# Altium footprint library WR-PHD_Socket Header.PcbLib: 279 footprints (part 9 of 18)
Each footprint in its own frame and in the unit in brackets; x right, y up, seen from the top. Pads: shape width x height; smd on the part's side, far side on the other; paste and mask are expansions set on the pad; w line width, h text height; cw(c..) or ccw(c..) is an arc to the next point about the centre after c.
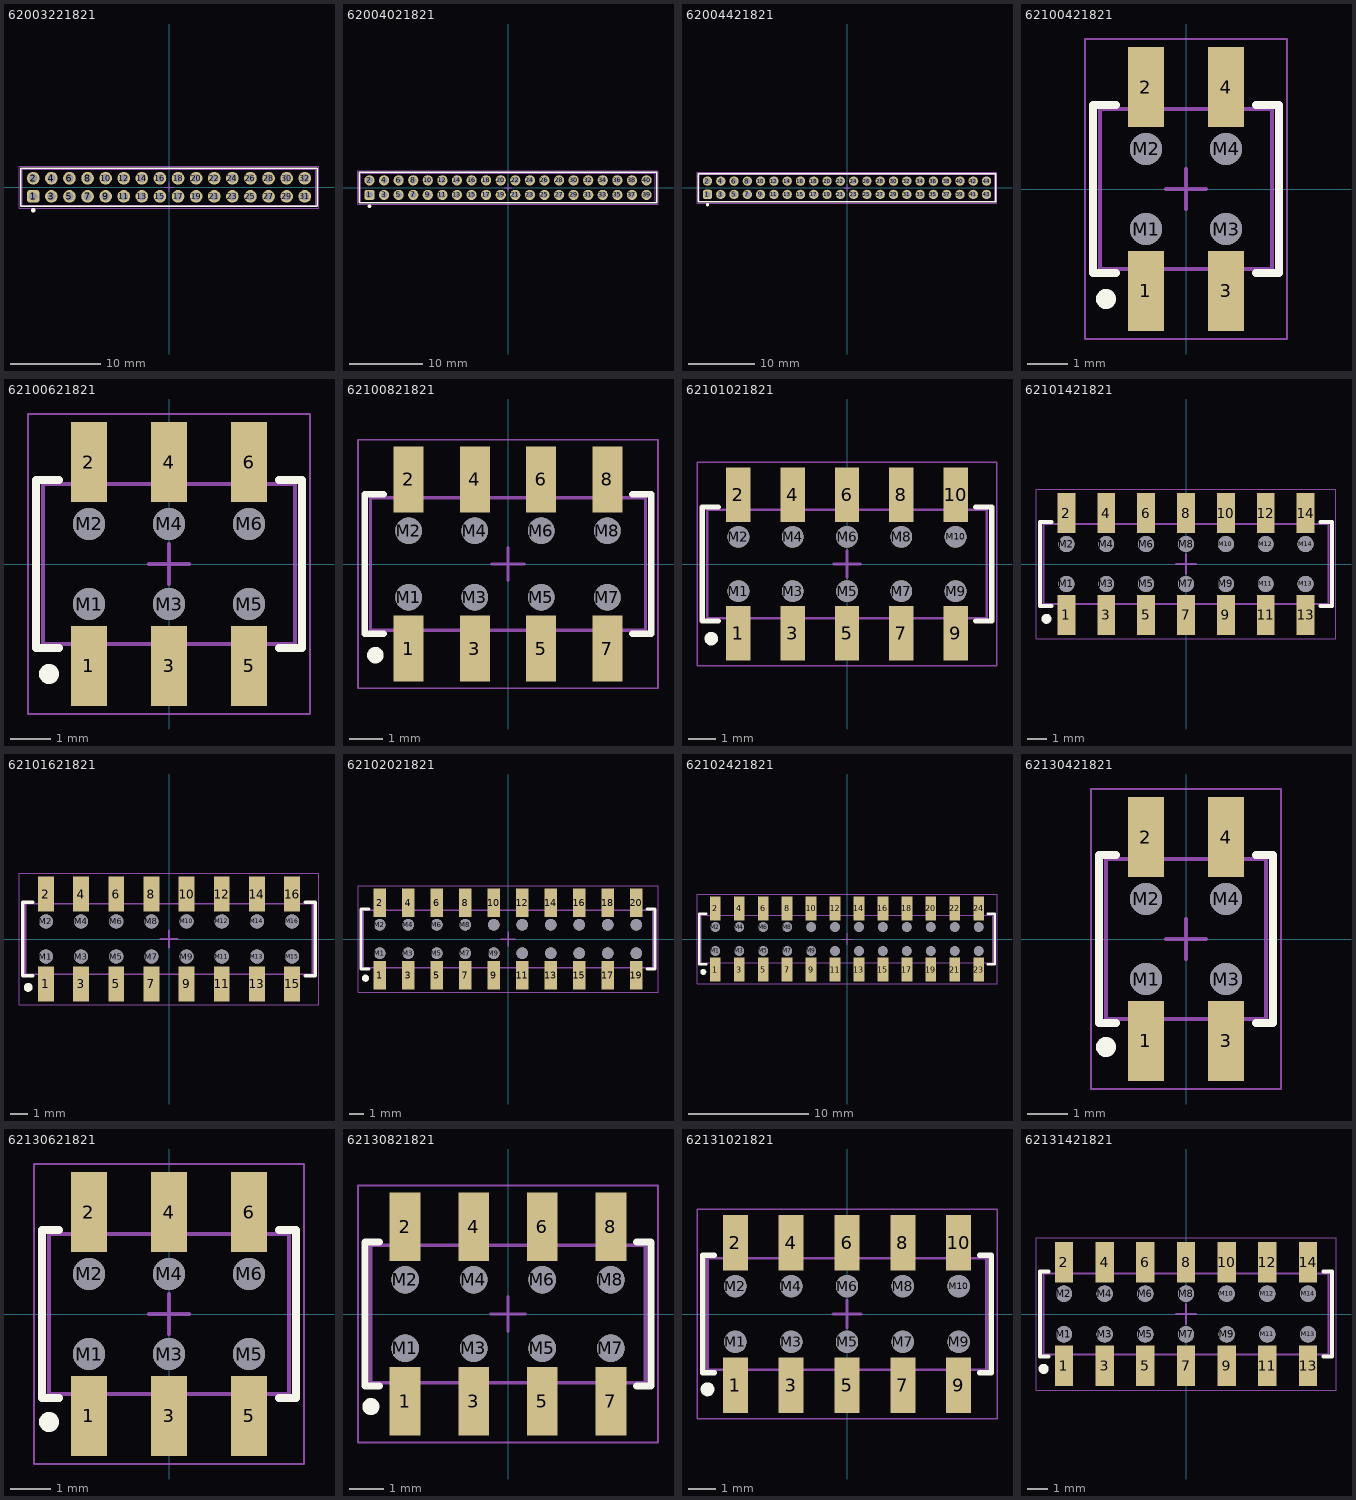
[diagram p8: the footprints below, top view; thin cyan lines are the x and y axes]

## 62003221821 [mm] "Socket Header, Pitch 2.00 mm, THT, Vertical, dual row, 32p"
height 4.45
pads (32):
  rrect50% 1.4x1.4 hole 0.9: 1(-15,-1)
  round 1.4 hole 0.9: 2(-15,1) 3(-13,-1) 4(-13,1) 5(-11,-1) 6(-11,1) 7(-9,-1) 8(-9,1) 9(-7,-1) 10(-7,1) 11(-5,-1) 12(-5,1) 13(-3,-1) 14(-3,1) 15(-1,-1) 16(-1,1) 17(1,-1) 18(1,1) 19(3,-1) 20(3,1) 21(5,-1) 22(5,1) 23(7,-1) 24(7,1) 25(9,-1) 26(9,1) 27(11,-1) 28(11,1) 29(13,-1) 30(13,1) 31(15,-1) 32(15,1)
Top Overlay:
  circle w0.25: c-15,-2.55 r0.125
  lines w0.2: -16.375,-2.1 -16.375,2.1 16.375,2.1 16.375,-2.1 -16.375,-2.1
Top Component Outline:
  lines w0.1: -16.2,-2 16.2,-2 16.2,2 -16.2,2 -16.2,-2
Top Designator:
  text ".Designator" at -3.647,-0.357 h1
Top Courtyard:
  lines w0.05: -16.575,-2.3 16.575,-2.3 16.575,2.3 -16.575,2.3 -16.575,-2.3
Top Component Center:
  lines w0.1: -0.5,0 0.5,0 ; 0,-0.5 0,0.5
3D body "62003221821.stp": height 4.35, standoff -2.65, extent -16.3,-2 16.3,2

## 62004021821 [mm] "Socket Header, Pitch 2.00 mm, THT, Vertical, dual row, 40p"
height 4.45
pads (40):
  rrect50% 1.4x1.4 hole 0.9: 1(-19,-1)
  round 1.4 hole 0.9: 2(-19,1) 3(-17,-1) 4(-17,1) 5(-15,-1) 6(-15,1) 7(-13,-1) 8(-13,1) 9(-11,-1) 10(-11,1) 11(-9,-1) 12(-9,1) 13(-7,-1) 14(-7,1) 15(-5,-1) 16(-5,1) 17(-3,-1) 18(-3,1) 19(-1,-1) 20(-1,1) 21(1,-1) 22(1,1) 23(3,-1) 24(3,1) 25(5,-1) 26(5,1) 27(7,-1) 28(7,1) 29(9,-1) 30(9,1) 31(11,-1) 32(11,1) 33(13,-1) 34(13,1) 35(15,-1) 36(15,1) 37(17,-1) 38(17,1) 39(19,-1) 40(19,1)
Top Overlay:
  circle w0.25: c-19,-2.55 r0.125
  lines w0.2: -20.375,-2.1 -20.375,2.1 20.375,2.1 20.375,-2.1 -20.375,-2.1
Top Component Outline:
  lines w0.1: -20.2,-2 20.2,-2 20.2,2 -20.2,2 -20.2,-2
Top Designator:
  text ".Designator" at -3.647,-0.357 h1
Top Courtyard:
  lines w0.05: -20.575,-2.3 20.575,-2.3 20.575,2.3 -20.575,2.3 -20.575,-2.3
Top Component Center:
  lines w0.1: -0.5,0 0.5,0 ; 0,-0.5 0,0.5
3D body "62004021821.stp": height 4.35, standoff -2.65, extent -20.3,-2 20.3,2

## 62004421821 [mm] "Socket Header, Pitch 2.00 mm, THT, Vertical, dual row, 44p"
height 4.45
pads (44):
  rrect50% 1.4x1.4 hole 0.9: 1(-21,-1)
  round 1.4 hole 0.9: 2(-21,1) 3(-19,-1) 4(-19,1) 5(-17,-1) 6(-17,1) 7(-15,-1) 8(-15,1) 9(-13,-1) 10(-13,1) 11(-11,-1) 12(-11,1) 13(-9,-1) 14(-9,1) 15(-7,-1) 16(-7,1) 17(-5,-1) 18(-5,1) 19(-3,-1) 20(-3,1) 21(-1,-1) 22(-1,1) 23(1,-1) 24(1,1) 25(3,-1) 26(3,1) 27(5,-1) 28(5,1) 29(7,-1) 30(7,1) 31(9,-1) 32(9,1) 33(11,-1) 34(11,1) 35(13,-1) 36(13,1) 37(15,-1) 38(15,1) 39(17,-1) 40(17,1) 41(19,-1) 42(19,1) 43(21,-1) 44(21,1)
Top Overlay:
  circle w0.25: c-21,-2.55 r0.125
  lines w0.2: -22.375,-2.1 22.375,-2.1 22.375,2.1 -22.375,2.1 -22.375,-2.1
Top Component Outline:
  lines w0.1: -22.2,-2 -22.2,2 22.2,2 22.2,-2 -22.2,-2
Top Designator:
  text ".Designator" at -3.647,-0.357 h1
Top Courtyard:
  lines w0.05: -22.575,-2.3 -22.575,2.3 22.575,2.3 22.575,-2.3 -22.575,-2.3
Top Component Center:
  lines w0.1: -0.5,0 0.5,0 ; 0,-0.5 0,0.5
3D body "62004421821.stp": height 4.35, standoff -2.65, extent -22.3,-2 22.3,2

## 62100421821 [mm] "Socket Header, Pitch 2.00 mm, SMT, Vertical, dual row, 4p"
height 2.35
pads (8):
  rect 0.9x2 smd: 1(-1,-2.55) 2(-1,2.55) 3(1,-2.55) 4(1,2.55)
  round 0.8 hole 0.8 unplated: M1(-1,-1) M2(-1,1) M3(1,-1) M4(1,1)
Top Overlay:
  circle w0.25: c-2,-2.75 r0.125
  lines w0.2: -1.75,-2.1 -2.325,-2.1 -2.325,2.1 -1.75,2.1 ; 1.75,-2.1 2.325,-2.1 2.325,2.1 1.75,2.1
Top Component Outline:
  lines w0.1: -1.25,-2 -1.25,-3 -0.75,-3 -0.75,-2 ; -1.25,2 -1.25,3 -0.75,3 -0.75,2 ; 0.75,-2 0.75,-3 1.25,-3 1.25,-2 ; 0.75,2 0.75,3 1.25,3 1.25,2 ; -2.15,-2 2.15,-2 2.15,2 -2.15,2 -2.15,-2
Top Designator:
  text ".Designator" at -3.647,-0.357 h1
Top Courtyard:
  lines w0.05: -2.525,-3.75 2.525,-3.75 2.525,3.75 -2.525,3.75 -2.525,-3.75
Top Component Center:
  lines w0.1: -0.5,0 0.5,0 ; 0,-0.5 0,0.5
3D body "62100421821.stp": height 2.1, standoff 0, extent -2,-3 2,3

## 62100621821 [mm] "Socket Header, Pitch 2.00 mm, SMT, Vertical, dual row, 6p"
height 2.35
pads (12):
  rect 0.9x2 smd: 1(-2,-2.55) 2(-2,2.55) 3(0,-2.55) 4(0,2.55) 5(2,-2.55) 6(2,2.55)
  round 0.8 hole 0.8 unplated: M1(-2,-1) M2(-2,1) M3(0,-1) M4(0,1) M5(2,-1) M6(2,1)
Top Overlay:
  circle w0.25: c-3,-2.75 r0.125
  lines w0.2: -2.75,-2.1 -3.325,-2.1 -3.325,2.1 -2.75,2.1 ; 2.75,-2.1 3.325,-2.1 3.325,2.1 2.75,2.1
Top Component Outline:
  lines w0.1: -2.25,-2 -2.25,-3 -1.75,-3 -1.75,-2 ; -2.25,2 -2.25,3 -1.75,3 -1.75,2 ; -0.25,-2 -0.25,-3 0.25,-3 0.25,-2 ; -0.25,2 -0.25,3 0.25,3 0.25,2 ; 1.75,-2 1.75,-3 2.25,-3 2.25,-2 ; 1.75,2 1.75,3 2.25,3 2.25,2 ; -3.15,-2 -3.15,2 3.15,2 3.15,-2 -3.15,-2
Top Designator:
  text ".Designator" at -3.647,-0.357 h1
Top Courtyard:
  lines w0.05: -3.525,-3.75 -3.525,3.75 3.525,3.75 3.525,-3.75 -3.525,-3.75
Top Component Center:
  lines w0.1: -0.5,0 0.5,0 ; 0,-0.5 0,0.5
3D body "62100621821.stp": height 2.1, standoff 0, extent -3,-2.998 3,2.998

## 62100821821 [mm] "Socket Header, Pitch 2.00 mm, SMT, Vertical, dual row, 8p"
height 2.35
pads (16):
  rect 0.9x2 smd: 1(-3,-2.55) 2(-3,2.55) 3(-1,-2.55) 4(-1,2.55) 5(1,-2.55) 6(1,2.55) 7(3,-2.55) 8(3,2.55)
  round 0.8 hole 0.8 unplated: M1(-3,-1) M2(-3,1) M3(-1,-1) M4(-1,1) M5(1,-1) M6(1,1) M7(3,-1) M8(3,1)
Top Overlay:
  circle w0.25: c-4,-2.75 r0.125
  lines w0.2: -3.75,-2.1 -4.325,-2.1 -4.325,2.1 -3.75,2.1 ; 3.75,-2.1 4.325,-2.1 4.325,2.1 3.75,2.1
Top Component Outline:
  lines w0.1: -3.25,-2 -3.25,-3 -2.75,-3 -2.75,-2 ; -3.25,2 -3.25,3 -2.75,3 -2.75,2 ; -1.25,-2 -1.25,-3 -0.75,-3 -0.75,-2 ; -1.25,2 -1.25,3 -0.75,3 -0.75,2 ; 0.75,-2 0.75,-3 1.25,-3 1.25,-2 ; 0.75,2 0.75,3 1.25,3 1.25,2 ; 2.75,-2 2.75,-3 3.25,-3 3.25,-2 ; 2.75,2 2.75,3 3.25,3 3.25,2 ; -4.15,-2 4.15,-2 4.15,2 -4.15,2 -4.15,-2
Top Designator:
  text ".Designator" at -3.647,-0.357 h1
Top Courtyard:
  lines w0.05: -4.525,-3.75 4.525,-3.75 4.525,3.75 -4.525,3.75 -4.525,-3.75
Top Component Center:
  lines w0.1: -0.5,0 0.5,0 ; 0,-0.5 0,0.5
3D body "62100821821.stp": height 2.1, standoff 0, extent -4,-3 4,3

## 62101021821 [mm] "Socket Header, Pitch 2.00 mm, SMT, Vertical, dual row, 10p"
height 2.35
pads (20):
  rect 0.9x2 smd: 1(-4,-2.55) 2(-4,2.55) 3(-2,-2.55) 4(-2,2.55) 5(0,-2.55) 6(0,2.55) 7(2,-2.55) 8(2,2.55) 9(4,-2.55) 10(4,2.55)
  round 0.8 hole 0.8 unplated: M1(-4,-1) M2(-4,1) M3(-2,-1) M4(-2,1) M5(0,-1) M6(0,1) M7(2,-1) M8(2,1) M9(4,-1) M10(4,1)
Top Overlay:
  circle w0.25: c-5,-2.75 r0.125
  lines w0.2: -4.75,-2.1 -5.325,-2.1 -5.325,2.1 -4.75,2.1 ; 4.75,-2.1 5.325,-2.1 5.325,2.1 4.75,2.1
Top Component Outline:
  lines w0.1: -4.25,-2 -4.25,-3 -3.75,-3 -3.75,-2 ; -4.25,2 -4.25,3 -3.75,3 -3.75,2 ; -2.25,-2 -2.25,-3 -1.75,-3 -1.75,-2 ; -2.25,2 -2.25,3 -1.75,3 -1.75,2 ; -0.25,-2 -0.25,-3 0.25,-3 0.25,-2 ; -0.25,2 -0.25,3 0.25,3 0.25,2 ; 1.75,-2 1.75,-3 2.25,-3 2.25,-2 ; 1.75,2 1.75,3 2.25,3 2.25,2 ; 3.75,-2 3.75,-3 4.25,-3 4.25,-2 ; 3.75,2 3.75,3 4.25,3 4.25,2 ; -5.15,-2 -5.15,2 5.15,2 5.15,-2 -5.15,-2
Top Designator:
  text ".Designator" at -3.647,-0.357 h1
Top Courtyard:
  lines w0.05: -5.525,-3.75 -5.525,3.75 5.525,3.75 5.525,-3.75 -5.525,-3.75
Top Component Center:
  lines w0.1: -0.5,0 0.5,0 ; 0,-0.5 0,0.5
3D body "62101021821.stp": height 2.1, standoff 0, extent -5,-3 5,3

## 62101421821 [mm] "Socket Header, Pitch 2.00 mm, SMT, Vertical, dual row, 14p"
height 2.35
pads (28):
  rect 0.9x2 smd: 1(-6,-2.55) 2(-6,2.55) 3(-4,-2.55) 4(-4,2.55) 5(-2,-2.55) 6(-2,2.55) 7(0,-2.55) 8(0,2.55) 9(2,-2.55) 10(2,2.55) 11(4,-2.55) 12(4,2.55) 13(6,-2.55) 14(6,2.55)
  round 0.8 hole 0.8 unplated: M1(-6,-1) M2(-6,1) M3(-4,-1) M4(-4,1) M5(-2,-1) M6(-2,1) M7(0,-1) M8(0,1) M9(2,-1) M10(2,1) M11(4,-1) M12(4,1) M13(6,-1) M14(6,1)
Top Overlay:
  circle w0.25: c-7,-2.75 r0.125
  lines w0.2: -6.75,-2.1 -7.325,-2.1 -7.325,2.1 -6.75,2.1 ; 6.75,-2.1 7.325,-2.1 7.325,2.1 6.75,2.1
Top Component Outline:
  lines w0.1: -6.25,-2 -6.25,-3 -5.75,-3 -5.75,-2 ; -6.25,2 -6.25,3 -5.75,3 -5.75,2 ; -4.25,-2 -4.25,-3 -3.75,-3 -3.75,-2 ; -4.25,2 -4.25,3 -3.75,3 -3.75,2 ; -2.25,-2 -2.25,-3 -1.75,-3 -1.75,-2 ; -2.25,2 -2.25,3 -1.75,3 -1.75,2 ; -0.25,-2 -0.25,-3 0.25,-3 0.25,-2 ; -0.25,2 -0.25,3 0.25,3 0.25,2 ; 1.75,-2 1.75,-3 2.25,-3 2.25,-2 ; 1.75,2 1.75,3 2.25,3 2.25,2 ; 3.75,-2 3.75,-3 4.25,-3 4.25,-2 ; 3.75,2 3.75,3 4.25,3 4.25,2 ; 5.75,-2 5.75,-3 6.25,-3 6.25,-2 ; 5.75,2 5.75,3 6.25,3 6.25,2 ; -7.15,-2 -7.15,2 7.15,2 7.15,-2 -7.15,-2
Top Designator:
  text ".Designator" at -3.647,-0.357 h1
Top Courtyard:
  lines w0.05: -7.525,-3.75 -7.525,3.75 7.525,3.75 7.525,-3.75 -7.525,-3.75
Top Component Center:
  lines w0.1: -0.5,0 0.5,0 ; 0,-0.5 0,0.5
3D body "62101421821.stp": height 2.1, standoff 0, extent -7,-3 7,3

## 62101621821 [mm] "Socket Header, Pitch 2.00 mm, SMT, Vertical, dual row, 16p"
height 2.35
pads (32):
  rect 0.9x2 smd: 1(-7,-2.55) 2(-7,2.55) 3(-5,-2.55) 4(-5,2.55) 5(-3,-2.55) 6(-3,2.55) 7(-1,-2.55) 8(-1,2.55) 9(1,-2.55) 10(1,2.55) 11(3,-2.55) 12(3,2.55) 13(5,-2.55) 14(5,2.55) 15(7,-2.55) 16(7,2.55)
  round 0.8 hole 0.8 unplated: M1(-7,-1) M2(-7,1) M3(-5,-1) M4(-5,1) M5(-3,-1) M6(-3,1) M7(-1,-1) M8(-1,1) M9(1,-1) M10(1,1) M11(3,-1) M12(3,1) M13(5,-1) M14(5,1) M15(7,-1) M16(7,1)
Top Overlay:
  circle w0.25: c-8,-2.75 r0.125
  lines w0.2: -7.75,-2.1 -8.325,-2.1 -8.325,2.1 -7.75,2.1 ; 7.75,-2.1 8.325,-2.1 8.325,2.1 7.75,2.1
Top Component Outline:
  lines w0.1: -7.25,-2 -7.25,-3 -6.75,-3 -6.75,-2 ; -7.25,2 -7.25,3 -6.75,3 -6.75,2 ; -5.25,-2 -5.25,-3 -4.75,-3 -4.75,-2 ; -5.25,2 -5.25,3 -4.75,3 -4.75,2 ; -3.25,-2 -3.25,-3 -2.75,-3 -2.75,-2 ; -3.25,2 -3.25,3 -2.75,3 -2.75,2 ; -1.25,-2 -1.25,-3 -0.75,-3 -0.75,-2 ; -1.25,2 -1.25,3 -0.75,3 -0.75,2 ; 0.75,-2 0.75,-3 1.25,-3 1.25,-2 ; 0.75,2 0.75,3 1.25,3 1.25,2 ; 2.75,-2 2.75,-3 3.25,-3 3.25,-2 ; 2.75,2 2.75,3 3.25,3 3.25,2 ; 4.75,-2 4.75,-3 5.25,-3 5.25,-2 ; 4.75,2 4.75,3 5.25,3 5.25,2 ; 6.75,-2 6.75,-3 7.25,-3 7.25,-2 ; 6.75,2 6.75,3 7.25,3 7.25,2 ; -8.15,-2 -8.15,2 8.15,2 8.15,-2 -8.15,-2
Top Designator:
  text ".Designator" at -3.647,-0.357 h1
Top Courtyard:
  lines w0.05: -8.525,-3.75 -8.525,3.75 8.525,3.75 8.525,-3.75 -8.525,-3.75
Top Component Center:
  lines w0.1: -0.5,0 0.5,0 ; 0,-0.5 0,0.5
3D body "62101621821.stp": height 2.1, standoff 0, extent -8,-3 8,3

## 62102021821 [mm] "Socket Header, Pitch 2.00 mm, SMT, Vertical, dual row, 20p"
height 2.35
pads (40):
  rect 0.9x2 smd: 1(-9,-2.55) 2(-9,2.55) 3(-7,-2.55) 4(-7,2.55) 5(-5,-2.55) 6(-5,2.55) 7(-3,-2.55) 8(-3,2.55) 9(-1,-2.55) 10(-1,2.55) 11(1,-2.55) 12(1,2.55) 13(3,-2.55) 14(3,2.55) 15(5,-2.55) 16(5,2.55) 17(7,-2.55) 18(7,2.55) 19(9,-2.55) 20(9,2.55)
  round 0.8 hole 0.8 unplated: M1(-9,-1) M2(-9,1) M3(-7,-1) M4(-7,1) M5(-5,-1) M6(-5,1) M7(-3,-1) M8(-3,1) M9(-1,-1) M10(-1,1) M11(1,-1) M12(1,1) M13(3,-1) M14(3,1) M15(5,-1) M16(5,1) M17(7,-1) M18(7,1) M19(9,-1) M20(9,1)
Top Overlay:
  circle w0.25: c-10,-2.75 r0.125
  lines w0.2: -9.75,-2.1 -10.325,-2.1 -10.325,2.1 -9.75,2.1 ; 9.75,-2.1 10.325,-2.1 10.325,2.1 9.75,2.1
Top Component Outline:
  lines w0.1: -9.25,-2 -9.25,-3 -8.75,-3 -8.75,-2 ; -9.25,2 -9.25,3 -8.75,3 -8.75,2 ; -7.25,-2 -7.25,-3 -6.75,-3 -6.75,-2 ; -7.25,2 -7.25,3 -6.75,3 -6.75,2 ; -5.25,-2 -5.25,-3 -4.75,-3 -4.75,-2 ; -5.25,2 -5.25,3 -4.75,3 -4.75,2 ; -3.25,-2 -3.25,-3 -2.75,-3 -2.75,-2 ; -3.25,2 -3.25,3 -2.75,3 -2.75,2 ; -1.25,-2 -1.25,-3 -0.75,-3 -0.75,-2 ; -1.25,2 -1.25,3 -0.75,3 -0.75,2 ; 0.75,-2 0.75,-3 1.25,-3 1.25,-2 ; 0.75,2 0.75,3 1.25,3 1.25,2 ; 2.75,-2 2.75,-3 3.25,-3 3.25,-2 ; 2.75,2 2.75,3 3.25,3 3.25,2 ; 4.75,-2 4.75,-3 5.25,-3 5.25,-2 ; 4.75,2 4.75,3 5.25,3 5.25,2 ; 6.75,-2 6.75,-3 7.25,-3 7.25,-2 ; 6.75,2 6.75,3 7.25,3 7.25,2 ; 8.75,-2 8.75,-3 9.25,-3 9.25,-2 ; 8.75,2 8.75,3 9.25,3 9.25,2 ; -10.15,-2 -10.15,2 10.15,2 10.15,-2 -10.15,-2
Top Designator:
  text ".Designator" at -3.647,-0.357 h1
Top Courtyard:
  lines w0.05: -10.525,-3.75 -10.525,3.75 10.525,3.75 10.525,-3.75 -10.525,-3.75
Top Component Center:
  lines w0.1: -0.5,0 0.5,0 ; 0,-0.5 0,0.5
3D body "62102021821.stp": height 2.1, standoff 0, extent -10,-3 10,3

## 62102421821 [mm] "Socket Header, Pitch 2.00 mm, SMT, Vertical, dual row, 24p"
height 2.35
pads (48):
  rect 0.9x2 smd: 1(-11,-2.55) 2(-11,2.55) 3(-9,-2.55) 4(-9,2.55) 5(-7,-2.55) 6(-7,2.55) 7(-5,-2.55) 8(-5,2.55) 9(-3,-2.55) 10(-3,2.55) 11(-1,-2.55) 12(-1,2.55) 13(1,-2.55) 14(1,2.55) 15(3,-2.55) 16(3,2.55) 17(5,-2.55) 18(5,2.55) 19(7,-2.55) 20(7,2.55) 21(9,-2.55) 22(9,2.55) 23(11,-2.55) 24(11,2.55)
  round 0.8 hole 0.8 unplated: M1(-11,-1) M2(-11,1) M3(-9,-1) M4(-9,1) M5(-7,-1) M6(-7,1) M7(-5,-1) M8(-5,1) M9(-3,-1) M10(-3,1) M11(-1,-1) M12(-1,1) M13(1,-1) M14(1,1) M15(3,-1) M16(3,1) M17(5,-1) M18(5,1) M19(7,-1) M20(7,1) M21(9,-1) M22(9,1) M23(11,-1) M24(11,1)
Top Overlay:
  circle w0.25: c-12,-2.75 r0.125
  lines w0.2: -11.75,-2.1 -12.325,-2.1 -12.325,2.1 -11.75,2.1 ; 11.75,-2.1 12.325,-2.1 12.325,2.1 11.75,2.1
Top Component Outline:
  lines w0.1: -11.25,-2 -11.25,-3 -10.75,-3 -10.75,-2 ; -11.25,2 -11.25,3 -10.75,3 -10.75,2 ; -9.25,-2 -9.25,-3 -8.75,-3 -8.75,-2 ; -9.25,2 -9.25,3 -8.75,3 -8.75,2 ; -7.25,-2 -7.25,-3 -6.75,-3 -6.75,-2 ; -7.25,2 -7.25,3 -6.75,3 -6.75,2 ; -5.25,-2 -5.25,-3 -4.75,-3 -4.75,-2 ; -5.25,2 -5.25,3 -4.75,3 -4.75,2 ; -3.25,-2 -3.25,-3 -2.75,-3 -2.75,-2 ; -3.25,2 -3.25,3 -2.75,3 -2.75,2 ; -1.25,-2 -1.25,-3 -0.75,-3 -0.75,-2 ; -1.25,2 -1.25,3 -0.75,3 -0.75,2 ; 0.75,-2 0.75,-3 1.25,-3 1.25,-2 ; 0.75,2 0.75,3 1.25,3 1.25,2 ; 2.75,-2 2.75,-3 3.25,-3 3.25,-2 ; 2.75,2 2.75,3 3.25,3 3.25,2 ; 4.75,-2 4.75,-3 5.25,-3 5.25,-2 ; 4.75,2 4.75,3 5.25,3 5.25,2 ; 6.75,-2 6.75,-3 7.25,-3 7.25,-2 ; 6.75,2 6.75,3 7.25,3 7.25,2 ; 8.75,-2 8.75,-3 9.25,-3 9.25,-2 ; 8.75,2 8.75,3 9.25,3 9.25,2 ; 10.75,-2 10.75,-3 11.25,-3 11.25,-2 ; 10.75,2 10.75,3 11.25,3 11.25,2 ; -12.15,-2 -12.15,2 12.15,2 12.15,-2 -12.15,-2
Top Designator:
  text ".Designator" at -3.647,-0.357 h1
Top Courtyard:
  lines w0.05: -12.525,-3.75 -12.525,3.75 12.525,3.75 12.525,-3.75 -12.525,-3.75
Top Component Center:
  lines w0.1: -0.5,0 0.5,0 ; 0,-0.5 0,0.5
3D body "62102421821.stp": height 2.1, standoff 0, extent -12,-3 12,3

## 62130421821 [mm] "Socket Header, Pitch 2.00 mm, SMT, Vertical, dual row, 4p"
height 2.35
pads (8):
  rect 0.9x2 smd: 1(-1,-2.55) 2(-1,2.55) 3(1,-2.55) 4(1,2.55)
  round 0.8 hole 0.8 unplated: M1(-1,-1) M2(-1,1) M3(1,-1) M4(1,1)
Top Overlay:
  circle w0.25: c-2,-2.7 r0.125
  lines w0.2: -1.75,-2.1 -2.175,-2.1 -2.175,2.1 -1.75,2.1 ; 1.75,-2.1 2.175,-2.1 2.175,2.1 1.75,2.1
Top Component Outline:
  lines w0.1: -1.25,-2 -1.25,-3 -0.75,-3 -0.75,-2 ; -1.25,2 -1.25,3 -0.75,3 -0.75,2 ; 0.75,-2 0.75,-3 1.25,-3 1.25,-2 ; 0.75,2 0.75,3 1.25,3 1.25,2 ; -2,-2 2,-2 2,2 -2,2 -2,-2
Top Designator:
  text ".Designator" at -3.647,-0.357 h1
Top Courtyard:
  lines w0.05: -2.375,-3.75 2.375,-3.75 2.375,3.75 -2.375,3.75 -2.375,-3.75
Top Component Center:
  lines w0.1: -0.5,0 0.5,0 ; 0,-0.5 0,0.5
3D body "62130421821.stp": height 2.95, standoff 0, extent -2,-3 2,3

## 62130621821 [mm] "Socket Header, Pitch 2.00 mm, SMT, Vertical, dual row, 6p"
height 2.35
pads (12):
  rect 0.9x2 smd: 1(-2,-2.55) 2(-2,2.55) 3(0,-2.55) 4(0,2.55) 5(2,-2.55) 6(2,2.55)
  round 0.8 hole 0.8 unplated: M1(-2,-1) M2(-2,1) M3(0,-1) M4(0,1) M5(2,-1) M6(2,1)
Top Overlay:
  circle w0.25: c-3,-2.7 r0.125
  lines w0.2: -2.75,-2.1 -3.175,-2.1 -3.175,2.1 -2.75,2.1 ; 2.75,-2.1 3.175,-2.1 3.175,2.1 2.75,2.1
Top Component Outline:
  lines w0.1: -2.25,-2 -2.25,-3 -1.75,-3 -1.75,-2 ; -2.25,2 -2.25,3 -1.75,3 -1.75,2 ; -0.25,-2 -0.25,-3 0.25,-3 0.25,-2 ; -0.25,2 -0.25,3 0.25,3 0.25,2 ; 1.75,-2 1.75,-3 2.25,-3 2.25,-2 ; 1.75,2 1.75,3 2.25,3 2.25,2 ; -3,-2 3,-2 3,2 -3,2 -3,-2
Top Designator:
  text ".Designator" at -3.647,-0.357 h1
Top Courtyard:
  lines w0.05: -3.375,-3.75 3.375,-3.75 3.375,3.75 -3.375,3.75 -3.375,-3.75
Top Component Center:
  lines w0.1: -0.5,0 0.5,0 ; 0,-0.5 0,0.5
3D body "62130621821.stp": height 2.95, standoff 0, extent -3,-3 3,3

## 62130821821 [mm] "Socket Header, Pitch 2.00 mm, SMT, Vertical, dual row, 8p"
height 2.35
pads (16):
  rect 0.9x2 smd: 1(-3,-2.55) 2(-3,2.55) 3(-1,-2.55) 4(-1,2.55) 5(1,-2.55) 6(1,2.55) 7(3,-2.55) 8(3,2.55)
  round 0.8 hole 0.8 unplated: M1(-3,-1) M2(-3,1) M3(-1,-1) M4(-1,1) M5(1,-1) M6(1,1) M7(3,-1) M8(3,1)
Top Overlay:
  circle w0.25: c-4,-2.7 r0.125
  lines w0.2: -3.75,-2.1 -4.175,-2.1 -4.175,2.1 -3.75,2.1 ; 3.75,-2.1 4.175,-2.1 4.175,2.1 3.75,2.1
Top Component Outline:
  lines w0.1: -3.25,-2 -3.25,-3 -2.75,-3 -2.75,-2 ; -3.25,2 -3.25,3 -2.75,3 -2.75,2 ; -1.25,-2 -1.25,-3 -0.75,-3 -0.75,-2 ; -1.25,2 -1.25,3 -0.75,3 -0.75,2 ; 0.75,-2 0.75,-3 1.25,-3 1.25,-2 ; 0.75,2 0.75,3 1.25,3 1.25,2 ; 2.75,-2 2.75,-3 3.25,-3 3.25,-2 ; 2.75,2 2.75,3 3.25,3 3.25,2 ; -4,-2 4,-2 4,2 -4,2 -4,-2
Top Designator:
  text ".Designator" at -3.647,-0.357 h1
Top Courtyard:
  lines w0.05: -4.375,-3.75 4.375,-3.75 4.375,3.75 -4.375,3.75 -4.375,-3.75
Top Component Center:
  lines w0.1: -0.5,0 0.5,0 ; 0,-0.5 0,0.5
3D body "62130821821.stp": height 2.95, standoff 0, extent -4,-3 4,3

## 62131021821 [mm] "Socket Header, Pitch 2.00 mm, SMT, Vertical, dual row, 10p"
height 2.35
pads (20):
  rect 0.9x2 smd: 1(-4,-2.55) 2(-4,2.55) 3(-2,-2.55) 4(-2,2.55) 5(0,-2.55) 6(0,2.55) 7(2,-2.55) 8(2,2.55) 9(4,-2.55) 10(4,2.55)
  round 0.8 hole 0.8 unplated: M1(-4,-1) M2(-4,1) M3(-2,-1) M4(-2,1) M5(0,-1) M6(0,1) M7(2,-1) M8(2,1) M9(4,-1) M10(4,1)
Top Overlay:
  circle w0.25: c-5,-2.7 r0.125
  lines w0.2: -4.75,-2.1 -5.175,-2.1 -5.175,2.1 -4.75,2.1 ; 4.75,-2.1 5.175,-2.1 5.175,2.1 4.75,2.1
Top Component Outline:
  lines w0.1: -4.25,-2 -4.25,-3 -3.75,-3 -3.75,-2 ; -4.25,2 -4.25,3 -3.75,3 -3.75,2 ; -2.25,-2 -2.25,-3 -1.75,-3 -1.75,-2 ; -2.25,2 -2.25,3 -1.75,3 -1.75,2 ; -0.25,-2 -0.25,-3 0.25,-3 0.25,-2 ; -0.25,2 -0.25,3 0.25,3 0.25,2 ; 1.75,-2 1.75,-3 2.25,-3 2.25,-2 ; 1.75,2 1.75,3 2.25,3 2.25,2 ; 3.75,-2 3.75,-3 4.25,-3 4.25,-2 ; 3.75,2 3.75,3 4.25,3 4.25,2 ; -5,-2 5,-2 5,2 -5,2 -5,-2
Top Designator:
  text ".Designator" at -3.647,-0.357 h1
Top Courtyard:
  lines w0.05: -5.375,-3.75 5.375,-3.75 5.375,3.75 -5.375,3.75 -5.375,-3.75
Top Component Center:
  lines w0.1: -0.5,0 0.5,0 ; 0,-0.5 0,0.5
3D body "62131021821.stp": height 2.95, standoff 0, extent -5,-3 5,3

## 62131421821 [mm] "Socket Header, Pitch 2.00 mm, SMT, Vertical, dual row, 14p"
height 2.35
pads (28):
  rect 0.9x2 smd: 1(-6,-2.55) 2(-6,2.55) 3(-4,-2.55) 4(-4,2.55) 5(-2,-2.55) 6(-2,2.55) 7(0,-2.55) 8(0,2.55) 9(2,-2.55) 10(2,2.55) 11(4,-2.55) 12(4,2.55) 13(6,-2.55) 14(6,2.55)
  round 0.8 hole 0.8 unplated: M1(-6,-1) M2(-6,1) M3(-4,-1) M4(-4,1) M5(-2,-1) M6(-2,1) M7(0,-1) M8(0,1) M9(2,-1) M10(2,1) M11(4,-1) M12(4,1) M13(6,-1) M14(6,1)
Top Overlay:
  circle w0.25: c-7,-2.7 r0.125
  lines w0.2: -6.75,-2.1 -7.175,-2.1 -7.175,2.1 -6.75,2.1 ; 6.75,-2.1 7.175,-2.1 7.175,2.1 6.75,2.1
Top Component Outline:
  lines w0.1: -6.25,-2 -6.25,-3 -5.75,-3 -5.75,-2 ; -6.25,2 -6.25,3 -5.75,3 -5.75,2 ; -4.25,-2 -4.25,-3 -3.75,-3 -3.75,-2 ; -4.25,2 -4.25,3 -3.75,3 -3.75,2 ; -2.25,-2 -2.25,-3 -1.75,-3 -1.75,-2 ; -2.25,2 -2.25,3 -1.75,3 -1.75,2 ; -0.25,-2 -0.25,-3 0.25,-3 0.25,-2 ; -0.25,2 -0.25,3 0.25,3 0.25,2 ; 1.75,-2 1.75,-3 2.25,-3 2.25,-2 ; 1.75,2 1.75,3 2.25,3 2.25,2 ; 3.75,-2 3.75,-3 4.25,-3 4.25,-2 ; 3.75,2 3.75,3 4.25,3 4.25,2 ; 5.75,-2 5.75,-3 6.25,-3 6.25,-2 ; 5.75,2 5.75,3 6.25,3 6.25,2 ; -7,-2 7,-2 7,2 -7,2 -7,-2
Top Designator:
  text ".Designator" at -3.647,-0.357 h1
Top Courtyard:
  lines w0.05: -7.375,-3.75 7.375,-3.75 7.375,3.75 -7.375,3.75 -7.375,-3.75
Top Component Center:
  lines w0.1: -0.5,0 0.5,0 ; 0,-0.5 0,0.5
3D body "62131421821.stp": height 2.95, standoff 0, extent -7,-3 7,3